# EAGLE library part OPT4001DTSR (library card_samac_3d)
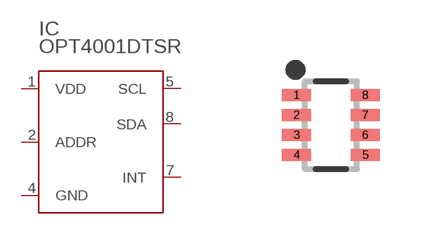
[diagram p6: symbol with the pads of DTS0008A-MFG; footprint DTS0008A-MFG]

Designator prefix IC

## OPT4001DTSRDTS0008A-MFG  [DTS0008A-MFG]
1  VDD  pwr
2  ADDR  in
4  GND  pwr
5  SCL  in
7  INT  oc
8  SDA

## Footprint DTS0008A-MFG (pad centres in mm)
smd 0.72 x 0.3: 1 -0.86,0.75; 2 -0.86,0.25; 3 -0.86,-0.25; 4 -0.86,-0.75; 5 0.86,-0.75; 6 0.86,-0.25; 7 0.86,0.25; 8 0.86,0.75